# Altium footprint library 2020-02-23_13-35-01.PcbLib: 1 footprints
Each footprint in its own frame and in the unit in brackets; x right, y up, seen from the top. Pads: shape width x height; smd on the part's side, far side on the other; paste and mask are expansions set on the pad; w line width, h text height; cw(c..) or ccw(c..) is an arc to the next point about the centre after c.
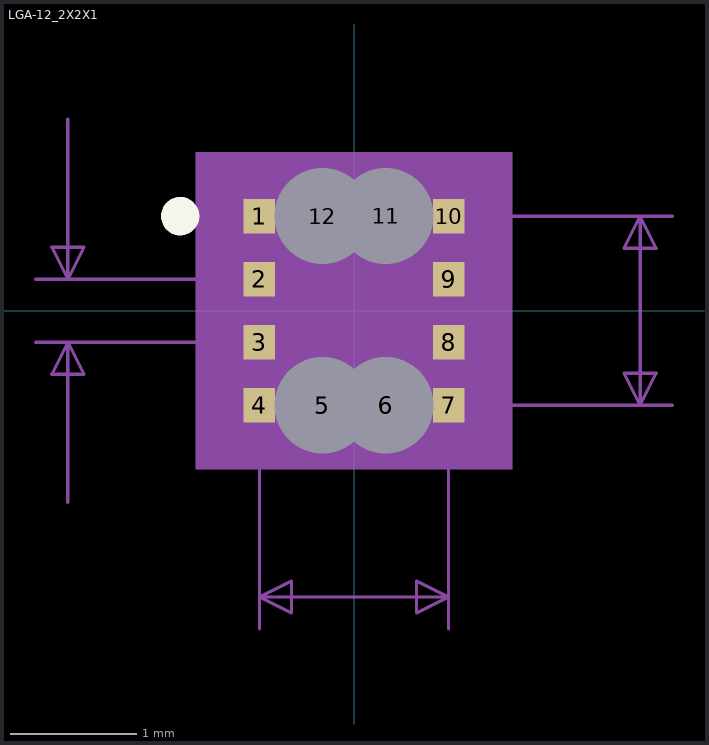
[diagram p0: the footprint, top view; thin cyan lines are the x and y axes]

## LGA-12_2X2X1 [mm]
pads (12):
  rect 0.25x0.275 smd: 1(-0.75,0.75) 2(-0.75,0.25) 3(-0.75,-0.25) 4(-0.75,-0.75) 7(0.75,-0.75) 8(0.75,-0.25) 9(0.75,0.25) 10(0.75,0.75)
  rect 0.25x0.275 hole 0.762: 5(-0.25,-0.75) 6(0.25,-0.75) 11(0.25,0.75) 12(-0.25,0.75)
Top Overlay:
  circle w0.152: c-1.379,0.75 r0.076
Mechanical 5:
  region: -1.256,1.256 1.256,1.256 1.256,-1.256 -1.256,-1.256
Mechanical 7:
  lines w0.025: -2.524,-0.25 -1.129,-0.25 ; -2.524,0.25 -1.129,0.25 ; -2.27,-1.52 -2.27,-0.25 ; -2.27,1.52 -2.27,0.25 ; -0.75,-2.524 -0.75,-1.141 ; 0.525,-0.75 2.524,-0.75 ; 0.525,0.75 2.524,0.75 ; 0.75,-2.524 0.75,-1.141 ; -2.27,-0.25 -2.143,-0.504 -2.397,-0.504 -2.27,-0.25 ; -2.27,0.25 -2.143,0.504 -2.397,0.504 -2.27,0.25 ; -0.75,-2.27 0.75,-2.27 ; -0.75,-2.27 -0.496,-2.397 -0.496,-2.143 -0.75,-2.27 ; 0.75,-2.27 0.496,-2.397 0.496,-2.143 0.75,-2.27 ; 2.27,-0.75 2.27,0.75 ; 2.27,-0.75 2.143,-0.496 2.397,-0.496 2.27,-0.75 ; 2.27,0.75 2.143,0.496 2.397,0.496 2.27,0.75
  text "Default Padstyle: RX9p84Y10p83D0T" at -10.477,-7.604 h1.27
  text "Alt 1 Padstyle: RX10p83Y9p84D30P" at -10.16,-12.176 h1.27
  text "Alt 2 Padstyle: OX90Y60D30P" at -8.572,-13.7 h1.27
Mechanical 13:
  circle w0: c-1.379,0.75 r0.076
  lines w0.025: -1,-0.27 0.27,1 ; -1,-1 1,-1 1,1 -1,1 -1,-1
Mechanical 15:
  region: 1.129,-1.129 -1.129,-1.129 -1.129,1.129 1.129,1.129
  lines w0.152: -1.129,-1.129 -1.129,1.129 1.129,1.129 1.129,-1.129 -1.129,-1.129
3D body: height 0.25, standoff 0, extent 0,0 0.254,0.254